# Altium footprint library Footprint.PcbLib: 411 footprints (part 8 of 26)
Each footprint in its own frame and in the unit in brackets; x right, y up, seen from the top. Pads: shape width x height; smd on the part's side, far side on the other; paste and mask are expansions set on the pad; w line width, h text height; cw(c..) or ccw(c..) is an arc to the next point about the centre after c.
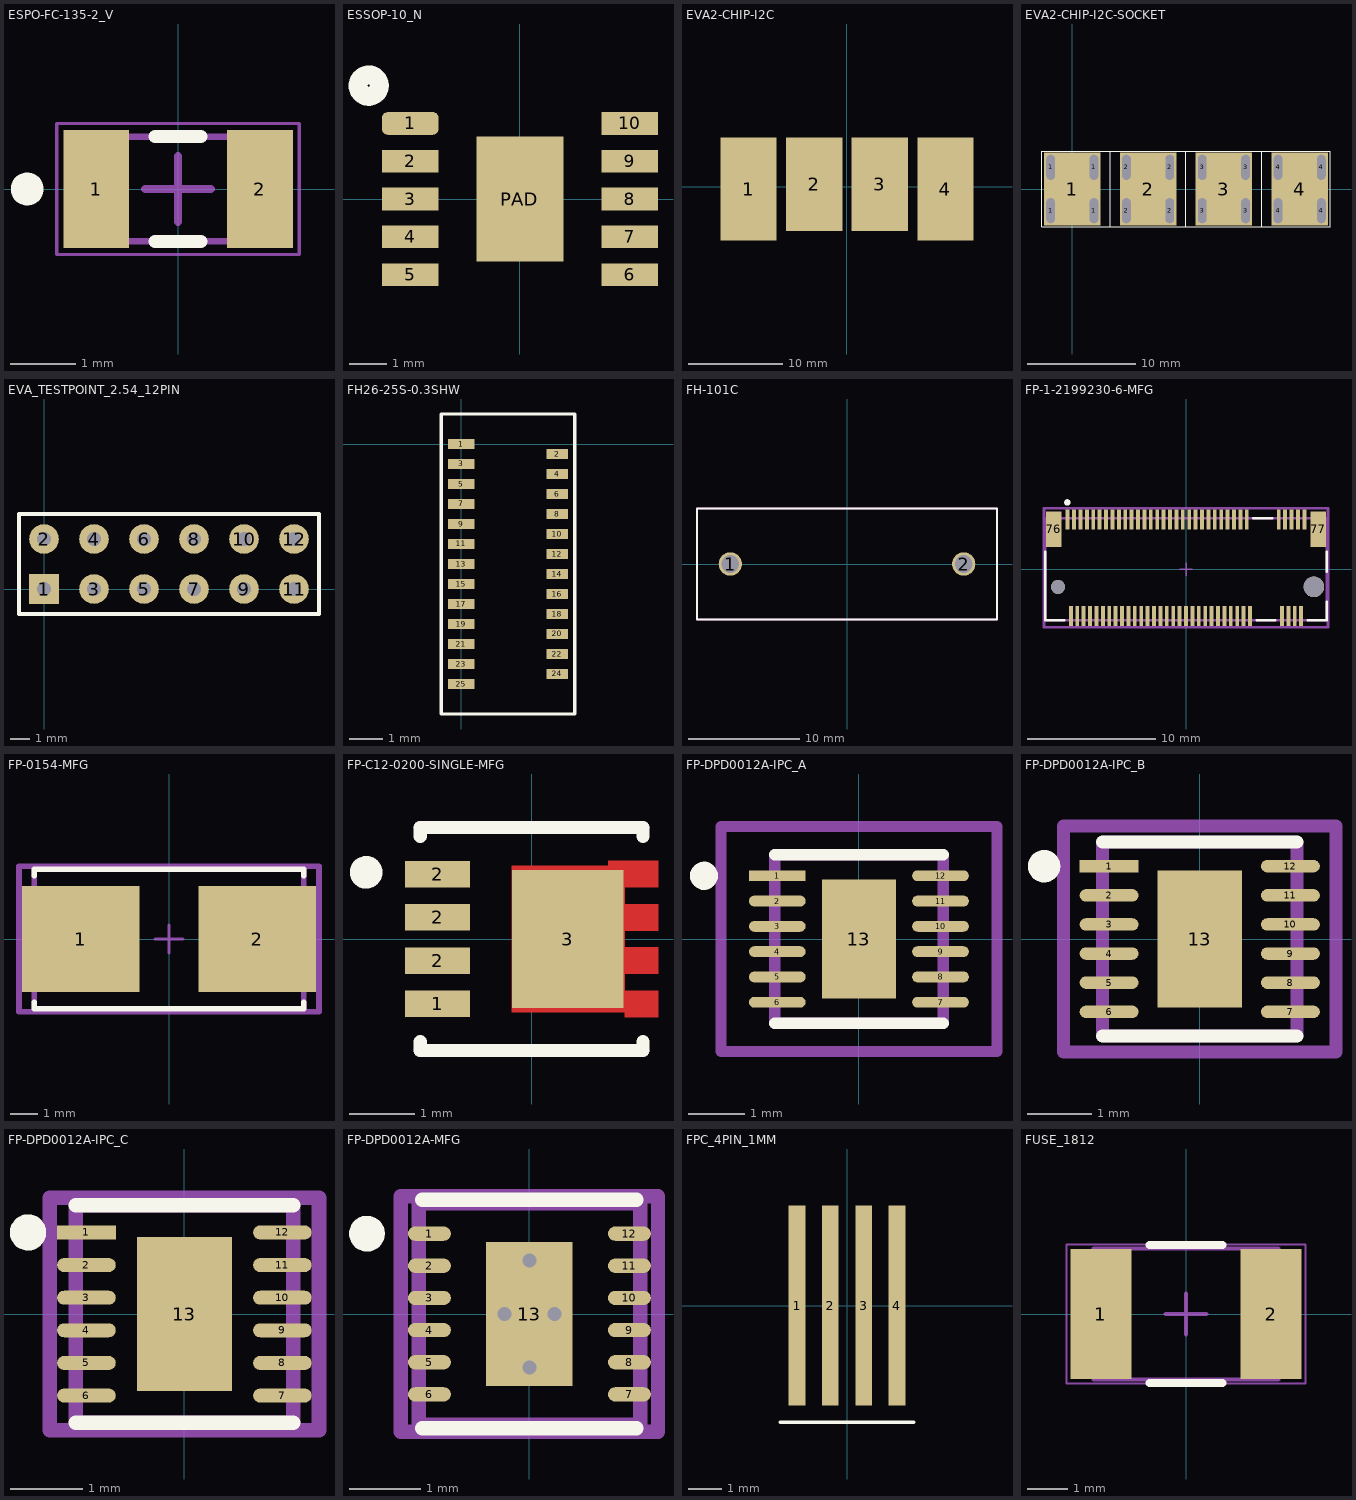
[diagram p7: the footprints below, top view; thin cyan lines are the x and y axes]

## ESPO-FC-135-2_V [mm] "SMD, 2-Leads, Body 3.3x1.6mm, Pitch 2.5mm"
height 0.9
pads (2):
  rect 1x1.8 smd: 1(-1.25,0) 2(1.25,0)
Top Overlay:
  circle w0.25: c-2.3,0 r0.125
  lines w0.2: -0.35,-0.8 0.35,-0.8 ; -0.35,0.8 0.35,0.8
Mechanical 13:
  lines w0.1: -1.65,-0.8 1.65,-0.8 1.65,0.8 -1.65,0.8 -1.65,-0.8
Mechanical 15:
  lines w0.05: -1.85,-1 -1.85,1 1.85,1 1.85,-1 -1.85,-1
  lines w0.127: -0.5,0 0.5,0 ; 0,-0.5 0,0.5
3D body: height 0.9, standoff 0, extent -1.65,-0.8 1.65,0.8

## ESSOP-10_N [mm] "Body 6x5"
pads (11):
  rrect50% 1.5x0.6 smd: 1(-2.9,2)
  rect 1.5x0.6 smd: 2(-2.9,1) 3(-2.9,0) 4(-2.9,-1) 5(-2.9,-2) 6(2.9,-2) 7(2.9,-1) 8(2.9,0) 9(2.9,1) 10(2.9,2)
  rect 2.3x3.3 smd: PAD(0,0)
Top Overlay:
  circle w0.5: c-4,3 r0.283
3D body "User Library-ssop10.step": height 1.56, standoff 0, extent -3,-2.45 3,2.45

## EVA2-CHIP-I2C [mm]
pads (4):
  rect 6x11 smd paste-2000: 1(-10.5,-0.25) 4(10.5,-0.25)
  rect 6x10 smd paste-2000: 2(-3.5,0.25) 3(3.5,0.25)

## EVA2-CHIP-I2C-SOCKET [mm]
pads (20):
  oval 0.8x2.3 hole 0.762 slot 2.3 at 90 deg: 1(-2,-2) 1(-2,2) 1(2,-2) 1(2,2) 2(5,-2) 2(5,2) 2(9,-2) 2(9,2) 3(12,-2) 3(12,2) 3(16,-2) 3(16,2) 4(19,-2) 4(19,2) 4(23,-2) 4(23,2)
  rect 5.2x6.7 all layers, no hole: 1(0,0) 2(7,0) 3(14,0) 4(21,0)
Top Overlay:
  lines w0.1: 3.5,-3.5 3.5,3.5 ; 10.5,-3.5 10.5,3.5 ; 17.5,-3.5 17.5,3.5 ; -2.8,-3.5 -2.8,3.5 23.8,3.5 23.8,-3.5 -2.8,-3.5

## EVA_TESTPOINT_2.54_12PIN [mm]
pads (12):
  rect 1.5x1.5 hole 0.7: 1(0,0)
  round 1.5 hole 0.7: 2(0,2.54) 3(2.54,0) 4(2.54,2.54) 5(5.08,0) 6(5.08,2.54) 7(7.62,0) 8(7.62,2.54) 9(10.16,0) 10(10.16,2.54) 11(12.7,0) 12(12.7,2.54)
Top Overlay:
  lines w0.2: -1.27,-1.27 13.97,-1.27 13.97,3.81 -1.27,3.81 -1.27,-1.27

## FH26-25S-0.3SHW [mm]
pads (25):
  rect 0.8x0.3 smd: 1(0,0) 3(0,-0.6) 5(0,-1.2) 7(0,-1.8) 9(0,-2.4) 11(0,-3) 13(0,-3.6) 15(0,-4.2) 17(0,-4.8) 19(0,-5.4) 21(0,-6) 23(0,-6.6) 25(0,-7.2)
  rect 0.65x0.3 smd: 2(2.875,-0.3) 4(2.875,-0.9) 6(2.875,-1.5) 8(2.875,-2.1) 10(2.875,-2.7) 12(2.875,-3.3) 14(2.875,-3.9) 16(2.875,-4.5) 18(2.875,-5.1) 20(2.875,-5.7) 22(2.875,-6.3) 24(2.875,-6.9)
Top Overlay:
  lines w0.1: -0.6,-8.1 -0.6,0.9 3.4,0.9 3.4,-8.1 -0.6,-8.1

## FH-101C [mm]
pads (2):
  round 2.1 hole 1.6 unplated: 1(-10.5,0) 2(10.5,0)
Top Overlay:
  lines w0.2: -13.5,-5 13.5,-5 13.5,5 -13.5,5 -13.5,-5
Mechanical 13:
  lines w0.2: -13.5,-5 -13.5,5 13.5,5 13.5,-5 -13.5,-5
3D body: height 13.4, standoff 0, extent -13.6,-5.1 13.6,5.1

## FP-1-2199230-6-MFG [mm]
pads (71):
  rect 0.3x1.55 smd paste+0 mask+0: 1(-9.25,3.9) 2(-9,-3.65) 3(-8.75,3.9) 4(-8.5,-3.65) 5(-8.25,3.9) 6(-8,-3.65) 7(-7.75,3.9) 8(-7.5,-3.65) 9(-7.25,3.9) 10(-7,-3.65) 11(-6.75,3.9) 12(-6.5,-3.65) 13(-6.25,3.9) 14(-6,-3.65) 15(-5.75,3.9) 16(-5.5,-3.65) 17(-5.25,3.9) 18(-5,-3.65) 19(-4.75,3.9) 20(-4.5,-3.65) 21(-4.25,3.9) 22(-4,-3.65) 23(-3.75,3.9) 24(-3.5,-3.65) 25(-3.25,3.9) 26(-3,-3.65) 27(-2.75,3.9) 28(-2.5,-3.65) 29(-2.25,3.9) 30(-2,-3.65) 31(-1.75,3.9) 32(-1.5,-3.65) 33(-1.25,3.9) 34(-1,-3.65) 35(-0.75,3.9) 36(-0.5,-3.65) 37(-0.25,3.9) 38(0,-3.65) 39(0.25,3.9) 40(0.5,-3.65) 41(0.75,3.9) 42(1,-3.65) 43(1.25,3.9) 44(1.5,-3.65) 45(1.75,3.9) 46(2,-3.65) 47(2.25,3.9) 48(2.5,-3.65) 49(2.75,3.9) 50(3,-3.65) 51(3.25,3.9) 52(3.5,-3.65) 53(3.75,3.9) 54(4,-3.65) 55(4.25,3.9) 56(4.5,-3.65) 57(4.75,3.9) 58(5,-3.65) 67(7.25,3.9) 68(7.5,-3.65) 69(7.75,3.9) 70(8,-3.65) 71(8.25,3.9) 72(8.5,-3.65) 73(8.75,3.9) 74(9,-3.65) 75(9.25,3.9)
  rect 1.2x2.75 smd paste+0 mask+0: 76(-10.35,3.125) 77(10.35,3.125)
  round 1.1 hole 1.1 unplated paste-1000 mask+0: ""(-10,-1.375)
  round 1.6 hole 1.6 unplated paste-1000 mask+0: ""(10,-1.375)
Top Overlay:
  circle w0.25: c-9.275,5.225 r0.125
  lines w0.2: -11,1.375 -11,-3.975 -9.525,-3.975 ; 5.275,3.975 6.725,3.975 ; 5.525,-3.975 6.975,-3.975 ; 9.525,-3.975 11,-3.975 11,-2.55 ; 11,-0.2 11,1.375
Assembly Bottom:
  lines w0.2: -11.1,-4.525 -11.1,4.775 11.1,4.775 11.1,-4.525 -11.1,-4.525
  text ".Designator" at 0,0.124 h1
Mechanical 13:
  lines w0.2: -11,-3.975 -11,3.975 11,3.975 11,-3.975 -11,-3.975
Mechanical 15:
  lines w0.2: -11.1,-4.525 -11.1,4.775 11.1,4.775 11.1,-4.525 -11.1,-4.525
Mechanical 16:
  lines w0.1: -0.5,0 0.5,0 ; 0,-0.5 0,0.5
3D body "Conn_TE_1-2199230-6_eec.STEP": height 0.25, standoff 0, extent -11.1,-4.525 11.1,4.775

## FP-0154-MFG [mil]
pads (2):
  rect 167x150 smd paste+0 mask+0: 1(-125.5,0) 2(125.5,0)
Top Overlay:
  lines w7.87: -191.54,-89.76 -191.54,-99.02 191.54,-99.02 191.54,-89.76 ; -191.54,89.76 -191.54,99.02 191.54,99.02 191.54,89.76
Assembly Top:
  lines w7.87: -212.94,-102.95 212.94,-102.95 212.94,102.95 -212.94,102.95 -212.94,-102.95
  text ".Designator" at 0,7.39 h39.37
Courtyard Top:
  lines w7.87: -212.94,-102.95 212.94,-102.95 212.94,102.95 -212.94,102.95 -212.94,-102.95
3D Body Top:
  lines w7.87: -191.54,-99.02 191.54,-99.02 191.54,99.02 -191.54,99.02 -191.54,-99.02
Top Component Center:
  lines w3.94: -19.68,0 19.68,0 ; 0,-19.68 0,19.68
3D body "Fuse_Littelfuse_Inc_0154_125DR_eec.STEP": height 10, standoff 0, extent -212.94,-102.95 212.94,102.95

## FP-C12-0200-SINGLE-MFG [mil]
pads (5):
  rect 39x16 smd paste+0 mask+0: 1(-56.5,-39) 2(-56.5,-13) 2(-56.5,13) 2(-56.5,39)
  rect 66.93x82.68 smd paste+0 mask+0: 3(21.65,0)
Top Layer:
  region: 76,47 46,47 46,44 -12,44 -12,-44 56,-44 56,-47 76,-47 76,-31 56,-31 56,-21 76,-21 76,-5 56,-5 56,5 76,5 76,21 56,21 56,31 76,31
Top Overlay:
  circle w9.84: c-99.41,40.11 r4.92
  lines w7.87: -66.93,-61.76 -66.93,-66.93 66.93,-66.93 66.93,-61.76 ; -66.93,61.76 -66.93,66.93 66.93,66.93 66.93,61.76
3D Body Top:
  lines w7.87: -66.93,-66.93 66.93,-66.93 ; -66.93,66.93 66.93,66.93
3D body "Trans_Vishay_SISS71DN-T1-GE3_eec.STEP": height 10, standoff 0, extent -79.94,-70.87 79.94,70.87

## FP-DPD0012A-IPC_A [mm]
pads (13):
  rect 1.01x0.192 smd paste+0 mask+0: 1(-1.451,1.125)
  rrect100% 1.01x0.192 smd paste+0 mask+0: 2(-1.451,0.675) 3(-1.451,0.225) 4(-1.451,-0.225) 5(-1.451,-0.675) 6(-1.451,-1.125) 7(1.451,-1.125) 8(1.451,-0.675) 9(1.451,-0.225) 10(1.451,0.225) 11(1.451,0.675) 12(1.451,1.125)
  rect 1.31x2.12 smd paste-1000 mask+0: 13(0,0)
Top Overlay:
  circle w0.25: c-2.756,1.125 r0.125
  lines w0.2: -1.5,-1.5 1.5,-1.5 ; -1.5,1.5 1.5,1.5
Top Paste:
  rectangle: -0.362,-0.767 0.362,0.767
Assembly Bottom:
  lines w0.2: -2.456,-2 2.456,-2 2.456,2 -2.456,2 -2.456,-2
  text ".Designator" at -0.5,2.088 h1
Mechanical 13:
  lines w0.2: -1.5,-1.5 1.5,-1.5 1.5,1.5 -1.5,1.5 -1.5,-1.5
Mechanical 15:
  lines w0.2: -2.456,-2 2.456,-2 2.456,2 -2.456,2 -2.456,-2
Mechanical 16:
  lines w0.1: -0.5,0 0.5,0 ; 0,-0.5 0,0.5
3D body "IC_Texas_Instruments_TPS65133DPDR_eec.STEP": height 0.25, standoff 0, extent -2.456,-2 2.456,2

## FP-DPD0012A-IPC_B [mm]
pads (13):
  rect 0.91x0.192 smd paste+0 mask+0: 1(-1.401,1.125)
  rrect100% 0.91x0.192 smd paste+0 mask+0: 2(-1.401,0.675) 3(-1.401,0.225) 4(-1.401,-0.225) 5(-1.401,-0.675) 6(-1.401,-1.125) 7(1.401,-1.125) 8(1.401,-0.675) 9(1.401,-0.225) 10(1.401,0.225) 11(1.401,0.675) 12(1.401,1.125)
  rect 1.31x2.12 smd paste-1000 mask+0: 13(0,0)
Top Overlay:
  circle w0.25: c-2.406,1.125 r0.125
  lines w0.2: -1.5,-1.5 1.5,-1.5 ; -1.5,1.5 1.5,1.5
Top Paste:
  rectangle: -0.362,-0.767 0.362,0.767
Assembly Bottom:
  lines w0.2: -2.106,-1.75 2.106,-1.75 2.106,1.75 -2.106,1.75 -2.106,-1.75
  text ".Designator" at -0.3,1.888 h1
Mechanical 13:
  lines w0.2: -1.5,-1.5 1.5,-1.5 1.5,1.5 -1.5,1.5 -1.5,-1.5
Mechanical 15:
  lines w0.2: -2.106,-1.75 2.106,-1.75 2.106,1.75 -2.106,1.75 -2.106,-1.75
Mechanical 16:
  lines w0.1: -0.5,0 0.5,0 ; 0,-0.5 0,0.5
3D body "IC_Texas_Instruments_TPS65133DPDR_eec.STEP": height 0.25, standoff 0, extent -2.106,-1.75 2.106,1.75

## FP-DPD0012A-IPC_C [mm]
pads (13):
  rect 0.81x0.192 smd paste+0 mask+0: 1(-1.351,1.125)
  rrect100% 0.81x0.192 smd paste+0 mask+0: 2(-1.351,0.675) 3(-1.351,0.225) 4(-1.351,-0.225) 5(-1.351,-0.675) 6(-1.351,-1.125) 7(1.351,-1.125) 8(1.351,-0.675) 9(1.351,-0.225) 10(1.351,0.225) 11(1.351,0.675) 12(1.351,1.125)
  rect 1.31x2.12 smd paste-1000 mask+0: 13(0,0)
Top Overlay:
  circle w0.25: c-2.156,1.125 r0.125
  lines w0.2: -1.5,-1.5 1.5,-1.5 ; -1.5,1.5 1.5,1.5
Top Paste:
  rectangle: -0.362,-0.767 0.362,0.767
Assembly Bottom:
  lines w0.2: -1.856,-1.6 -1.856,1.6 1.856,1.6 1.856,-1.6 -1.856,-1.6
  text ".Designator" at -0.4,1.688 h1
Mechanical 13:
  lines w0.2: -1.5,-1.5 -1.5,1.5 1.5,1.5 1.5,-1.5 -1.5,-1.5
Mechanical 15:
  lines w0.2: -1.856,-1.6 -1.856,1.6 1.856,1.6 1.856,-1.6 -1.856,-1.6
Mechanical 16:
  lines w0.1: -0.5,0 0.5,0 ; 0,-0.5 0,0.5
3D body "IC_Texas_Instruments_TPS65133DPDR_eec.STEP": height 0.25, standoff 0, extent -1.856,-1.6 1.856,1.6

## FP-DPD0012A-MFG [mm]
pads (13):
  rrect100% 0.6x0.2 smd paste+0 mask+0: 1(-1.4,1.125) 2(-1.4,0.675) 3(-1.4,0.225) 4(-1.4,-0.225) 5(-1.4,-0.675) 6(-1.4,-1.125) 7(1.4,-1.125) 8(1.4,-0.675) 9(1.4,-0.225) 10(1.4,0.225) 11(1.4,0.675) 12(1.4,1.125)
  rect 1.21x2.02 smd paste-1000 mask+0: 13(0,0)
via 0,0.75 diameter 0.5 hole 0.2
via 0,-0.75 diameter 0.5 hole 0.2
via 0.35,0 diameter 0.5 hole 0.2
via -0.35,0 diameter 0.5 hole 0.2
Top Overlay:
  circle w0.25: c-2.275,1.125 r0.125
  lines w0.2: -1.5,-1.6 1.5,-1.6 ; -1.5,1.6 1.5,1.6
Top Paste:
  rectangle: -0.565,0.1 0.565,1
  rectangle: -0.565,-1 0.565,-0.1
Assembly Bottom:
  lines w0.2: -1.8,-1.65 1.8,-1.65 1.8,1.65 -1.8,1.65 -1.8,-1.65
  text ".Designator" at -0.4,1.788 h1
Mechanical 13:
  lines w0.2: -1.55,-1.55 1.55,-1.55 1.55,1.55 -1.55,1.55 -1.55,-1.55
Mechanical 15:
  lines w0.2: -1.8,-1.65 1.8,-1.65 1.8,1.65 -1.8,1.65 -1.8,-1.65
Mechanical 16:
  lines w0.1: -0.5,0 0.5,0 ; 0,-0.5 0,0.5
3D body "IC_Texas_Instruments_TPS65133DPDR_eec.STEP": height 0.25, standoff 0, extent -1.8,-1.65 1.8,1.65

## FPC_4PIN_1MM [mm]
pads (4):
  rect 0.5x6 smd: 1(-1.5,0) 2(-0.5,0) 3(0.5,0) 4(1.5,0)
Top Overlay:
  lines w0.1: -2,-3.5 2,-3.5

## FUSE_1812 [mm] "SMD, 2-Leads, Body 4.55x3.24mm"
height 0.85
pads (2):
  rect 1.5x3.2 smd: 1(-2.1,0) 2(2.1,0)
Top Overlay:
  lines w0.2: -0.9,-1.7 0.9,-1.7 ; -0.9,1.7 0.9,1.7
Mechanical 13:
  lines w0.1: -2.275,-1.62 2.275,-1.62 ; -2.275,-1.62 -2.275,1.62 2.275,1.62 2.275,-1.62
Mechanical 15:
  lines w0.05: -2.95,-1.72 2.95,-1.72 2.95,1.72 -2.95,1.72 -2.95,-1.72
  lines w0.1: -0.5,0 0.5,0 ; 0,-0.5 0,0.5
3D body "mf-msmf075.stp": height 0.7, standoff 0, extent -2.275,-1.62 2.275,1.62